# Altium footprint library 8520-4500PL.PcbLib: 1 footprints
Each footprint in its own frame and in the unit in brackets; x right, y up, seen from the top. Pads: shape width x height; smd on the part's side, far side on the other; paste and mask are expansions set on the pad; w line width, h text height; cw(c..) or ccw(c..) is an arc to the next point about the centre after c.
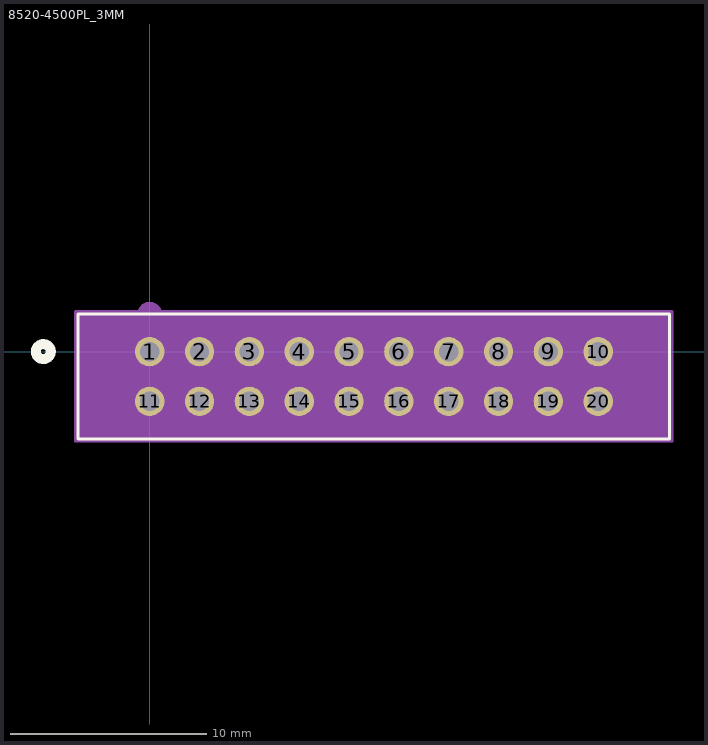
[diagram p0: the footprint, top view; thin cyan lines are the x and y axes]

## 8520-4500PL_3MM [mil]
pads (20):
  round 59 hole 39 paste-29.5 mask+0: 1(0,0) 2(100,0) 3(200,0) 4(300,0) 5(400,0) 6(500,0) 7(600,0) 8(700,0) 9(800,0) 10(900,0) 11(0,-100) 12(100,-100) 13(200,-100) 14(300,-100) 15(400,-100) 16(500,-100) 17(600,-100) 18(700,-100) 19(800,-100) 20(900,-100)
Top Overlay:
  circle w20: c-213.5,0 r15
  lines w6: -143.5,-174.92 1043.5,-174.92 1043.5,75.08 -143.5,75.08 -143.5,-174.92
  text ".Designator" at 312.5,-75 h50
Bottom Overlay:
  circle w20: c-213.5,0 r15
Mechanical 13:
  circle w20: c0,75 r15
  lines w1: -138.5,-169.92 1038.5,-169.92 1038.5,70.08 -138.5,70.08 -138.5,-169.92
  text ".Designator" at 312.5,-75 h50
Mechanical 15:
  region: 1048.5,80.08 -148.5,80.08 -148.5,-179.92 1048.5,-179.92
  lines w6: -148.5,-179.92 -148.5,80.08 1048.5,80.08 1048.5,-179.92 -148.5,-179.92